# Altium schematic symbol library IF_Amp.SchLib: 8 symbols
Pins are listed as number, name and electrical type; pins without a type are passive.

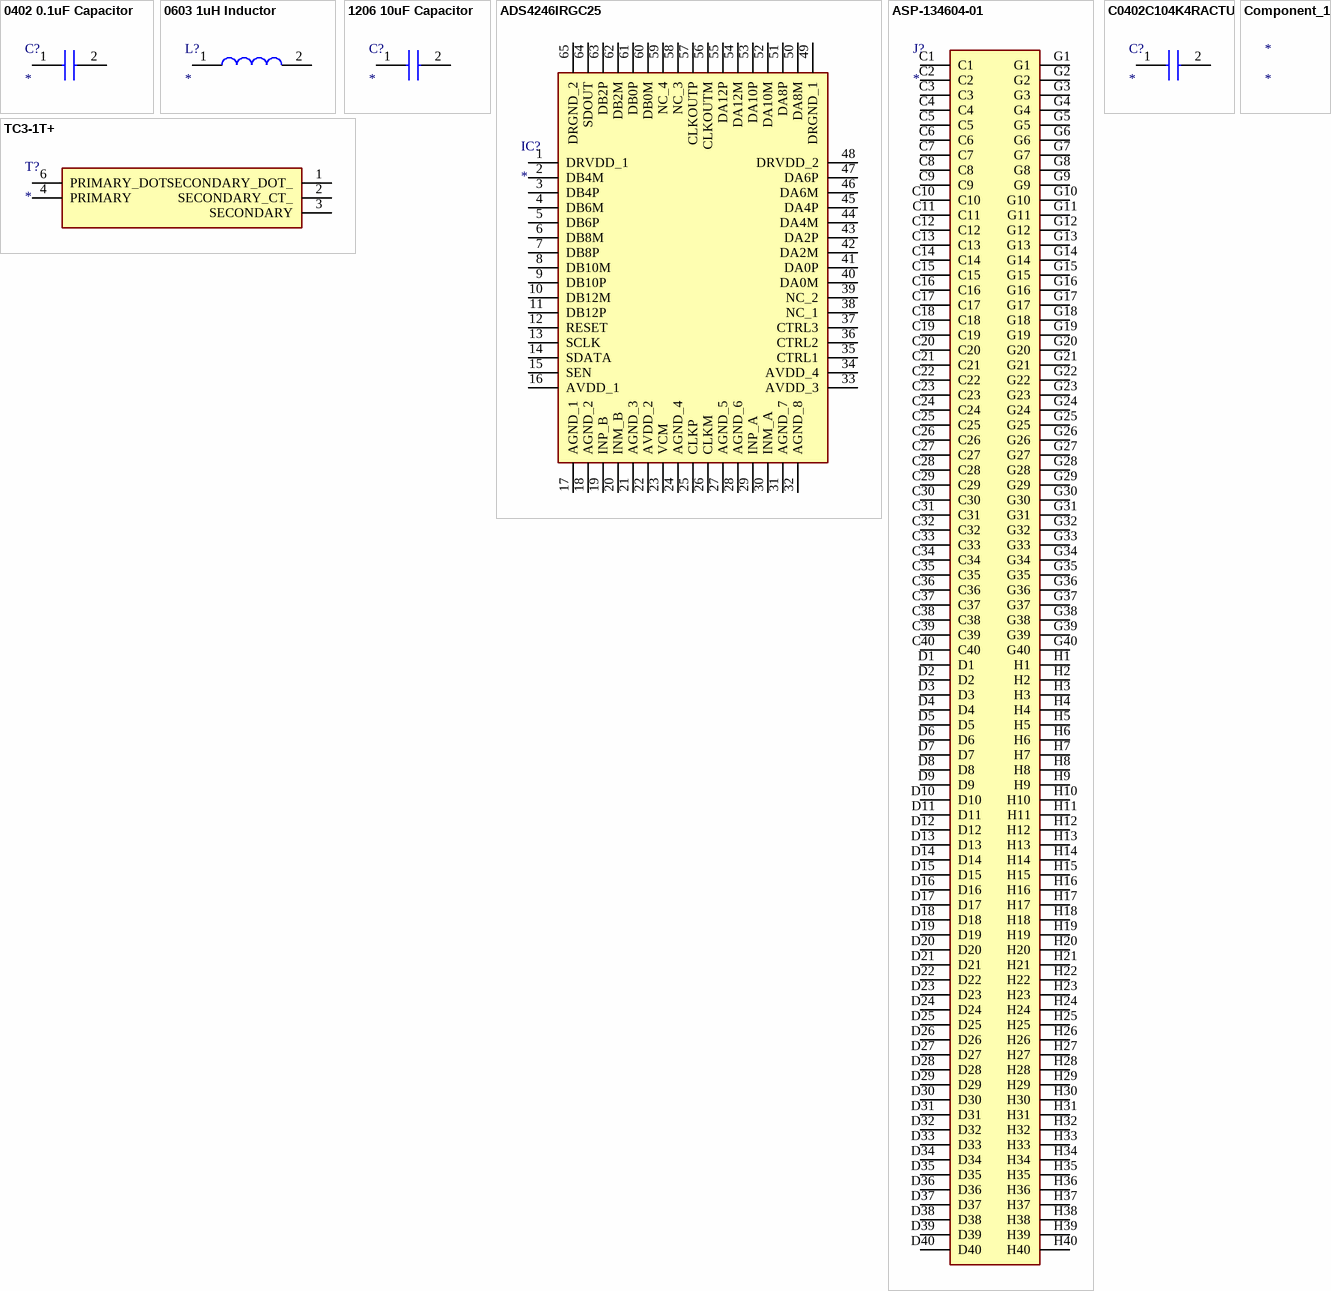
[diagram p0: symbols 0402 0.1uF Capacitor to TC3-1T+]

## 0402 0.1uF Capacitor
designator C?
C0402C104K4RACTU; Manufacturer_Name: Yageo Group; Description: SMD Comm X7R; Datasheet Link: https://content.kemet.com/datasheets/KEM_C1002_X7R_SMD.pdf; Height: 0.55mm; Manufacturer_Part_Number: C0402C104K4RACTU; Mouser Part Number: 80-C0402C104K4R; Mouser Price/Stock: https://www.mouser.co.uk/ProductDetail/KEMET/C0402C104K4RACTU?qs=DBJr%252BvBUjU54jK7d4uAeew%3D%3D; Arrow Part Number: C0402C104K4RACTU; Arrow Price/Stock: https://www.arrow.com/en/products/c0402c104k4ractu/kemet-corporation.html?utm_currency=USD&region=nac
footprint C0402C104J4RACTU
pins: 1, 2

## 0603 1uH Inductor
designator L?
7447610310; Manufacturer_Name: Wurth Elektronik; Description: WE-RFI SMT Ferrite Inductor Size 0603; L = 1000 nH  +/-5%; Q = 13; RDC = 700 m; Datasheet Link: https://www.we-online.com/catalog/datasheet/7447610310.pdf; Height: 0.9mm; Manufacturer_Part_Number: 7447610310
footprint 7447610310
pins: 1, 2

## 1206 10uF Capacitor
designator C?
C1206X106M3RACAUTO; Manufacturer_Name: Yageo Group; Description: SMD; Datasheet Link: https://www.yageogroup.com/content/datasheet/asset/file/KEM_C1078_X7R_FT-CAP_AUTO_SMD; Manufacturer_Part_Number: C1206X106M3RACAUTO; Mouser Part Number: 80-C1206X106M3RAUTO; Mouser Price/Stock: https://www.mouser.co.uk/ProductDetail/KEMET/C1206X106M3RACAUTO?qs=HXFqYaX1Q2xSroSoadzbnw%3D%3D; Arrow Part Number: C1206X106M3RACAUTO; Arrow Price/Stock: https://www.arrow.com/en/products/c1206x106m3racauto/kemet-corporation?utm_currency=USD&region=nac
footprint C1206_FT
pins: 1, 2

## ADS4246IRGC25
designator IC?
Integrated Circuit; Manufacturer_Name: Texas Instruments; Manufacturer_Part_Number: ADS4246IRGC25; Description: TEXAS INSTRUMENTS - ADS4246IRGC25 - Analogue to Digital Converter; Datasheet Link: https://media.digikey.com/pdf/Data%20Sheets/Texas%20Instruments%20PDFs/ADS42xx_Mar_2014.pdf; Height: 1mm
footprint QFN50P900X900X100-65N-D
pins: 1 DRVDD_1, 2 DB4M, 3 DB4P, 4 DB6M, 5 DB6P, 6 DB8M, 7 DB8P, 8 DB10M, 9 DB10P, 10 DB12M, 11 DB12P, 12 RESET, 13 SCLK, 14 SDATA, 15 SEN, 16 AVDD_1, 17 AGND_1, 18 AGND_2, 19 INP_B, 20 INM_B, 21 AGND_3, 22 AVDD_2, 23 VCM, 24 AGND_4, 25 CLKP, 26 CLKM, 27 AGND_5, 28 AGND_6, 29 INP_A, 30 INM_A, 31 AGND_7, 32 AGND_8, 33 AVDD_3, 34 AVDD_4, 35 CTRL1, 36 CTRL2, 37 CTRL3, 38 NC_1, 39 NC_2, 40 DA0M, 41 DA0P, 42 DA2M, 43 DA2P, 44 DA4M, 45 DA4P, 46 DA6M, 47 DA6P, 48 DRVDD_2, 49 DRGND_1, 50 DA8M, 51 DA8P, 52 DA10M, 53 DA10P, 54 DA12M, 55 DA12P, 56 CLKOUTM, 57 CLKOUTP, 58 NC_3, 59 NC_4, 60 DB0M, 61 DB0P, 62 DB2M, 63 DB2P, 64 SDOUT, 65 DRGND_2

## ASP-134604-01
designator J?
Connector; Manufacturer_Name: SAMTEC; Manufacturer_Part_Number: ASP-134604-01; Description: SAMTEC - ASP-134604-01 - Board-To-Board Connector; Datasheet Link: https://componentsearchengine.com/Datasheets/2/ASP-134604-01.pdf; Height: 7.11mm; Mouser Part Number: 200-ASP-134604-01; Mouser Price/Stock: https://www.mouser.co.uk/ProductDetail/Samtec/ASP-134604-01?qs=Rp%2FUEJiACm00i8g2mQ6XNw%3D%3D; Arrow Part Number: ASP-134604-01; Arrow Price/Stock: https://www.arrow.com/en/products/asp-134604-01/samtec.html?utm_currency=USD&region=nac
footprint ASP13460401
pins: C1, C2, C3, C4, C5, C6, C7, C8, C9, C10, C11, C12, C13, C14, C15, C16, C17, C18, C19, C20, C21, C22, C23, C24, C25, C26, C27, C28, C29, C30, C31, C32, C33, C34, C35, C36, C37, C38, C39, C40, D1, D2, D3, D4, D5, D6, D7, D8, D9, D10, D11, D12, D13, D14, D15, D16, D17, D18, D19, D20, D21, D22, D23, D24, D25, D26, D27, D28, D29, D30, D31, D32, D33, D34, D35, D36, D37, D38, D39, D40, G1, G2, G3, G4, G5, G6, G7, G8, G9, G10, G11, G12, G13, G14, G15, G16, G17, G18, G19, G20, G21, G22, G23, G24, G25, G26, G27, G28, G29, G30, G31, G32, G33, G34, G35, G36, G37, G38, G39, G40, H1, H2, H3, H4, H5, H6, H7, H8, H9, H10, H11, H12, H13, H14, H15, H16, H17, H18, H19, H20, H21, H22, H23, H24, H25, H26, H27, H28, H29, H30, H31, H32, H33, H34, H35, H36, H37, H38, H39, H40

## C0402C104K4RACTU
designator C?
Capacitor; Manufacturer_Name: Yageo Group; Manufacturer_Part_Number: C0402C104K4RACTU; Description: SMD Comm X7R; Datasheet Link: https://content.kemet.com/datasheets/KEM_C1002_X7R_SMD.pdf; Height: 0.55mm; Mouser Part Number: 80-C0402C104K4R; Mouser Price/Stock: https://www.mouser.co.uk/ProductDetail/KEMET/C0402C104K4RACTU?qs=DBJr%252BvBUjU54jK7d4uAeew%3D%3D; Arrow Part Number: C0402C104K4RACTU; Arrow Price/Stock: https://www.arrow.com/en/products/c0402c104k4ractu/kemet-corporation.html?utm_currency=USD&region=nac
footprint C0402C104J4RACTU
pins: 1, 2

## Component_1
designator *

## TC3-1T+
designator T?
Transformer; Manufacturer_Name: Mini-Circuits; Manufacturer_Part_Number: TC3-1T+; Description: SURFACE MOUNT RF TRANSFORMER; Datasheet Link: https://datasheet.datasheetarchive.com/originals/distributors/Datasheets-28/DSA-546328.pdf; Height: 4mm; Mouser Part Number: 139-TC3-1T; Mouser Price/Stock: https://www.mouser.co.uk/ProductDetail/Mini-Circuits/TC3-1T%2b?qs=xZ%2FP%252Ba9zWqZHx%2FHxCJInOw%3D%3D
footprint TC31T
pins: 1 SECONDARY_DOT_, 2 SECONDARY_CT_, 3 SECONDARY, 4 PRIMARY, 6 PRIMARY_DOT